# Altium schematic symbol library G4V_MINI.SchLib: 1 symbol
Pins are listed as number, name and electrical type; pins without a type are passive.

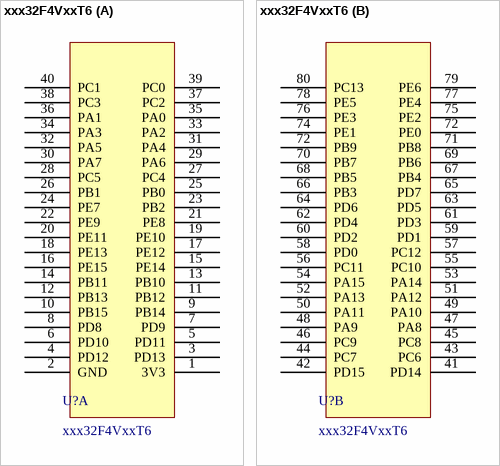
[diagram p0: symbol xxx32F4VxxT6]

## xxx32F4VxxT6
designator U?
part A pins: 1 3V3, 2 GND, 3 PD13, 4 PD12, 5 PD11, 6 PD10, 7 PD9, 8 PD8, 9 PB14, 10 PB15, 11 PB12, 12 PB13, 13 PB10, 14 PB11, 15 PE14, 16 PE15, 17 PE12, 18 PE13, 19 PE10, 20 PE11, 21 PE8, 22 PE9, 23 PB2, 24 PE7, 25 PB0, 26 PB1, 27 PC4, 28 PC5, 29 PA6, 30 PA7, 31 PA4, 32 PA5, 33 PA2, 34 PA3, 35 PA0, 36 PA1, 37 PC2, 38 PC3, 39 PC0, 40 PC1
part B pins: 41 PD14, 42 PD15, 43 PC6, 44 PC7, 45 PC8, 46 PC9, 47 PA8, 48 PA9, 49 PA10, 50 PA11, 51 PA12, 52 PA13, 53 PA14, 54 PA15, 55 PC10, 56 PC11, 57 PC12, 58 PD0, 59 PD1, 60 PD2, 61 PD3, 62 PD4, 63 PD5, 64 PD6, 65 PD7, 66 PB3, 67 PB4, 68 PB5, 69 PB6, 70 PB7, 71 PB8, 72 PB9, 72 PE0, 74 PE1, 75 PE2, 76 PE3, 77 PE4, 78 PE5, 79 PE6, 80 PC13